# Altium footprint library SBC_PcbLib.PcbLib: 52 footprints (part 4 of 4)
Each footprint in its own frame and in the unit in brackets; x right, y up, seen from the top. Pads: shape width x height; smd on the part's side, far side on the other; paste and mask are expansions set on the pad; w line width, h text height; cw(c..) or ccw(c..) is an arc to the next point about the centre after c.
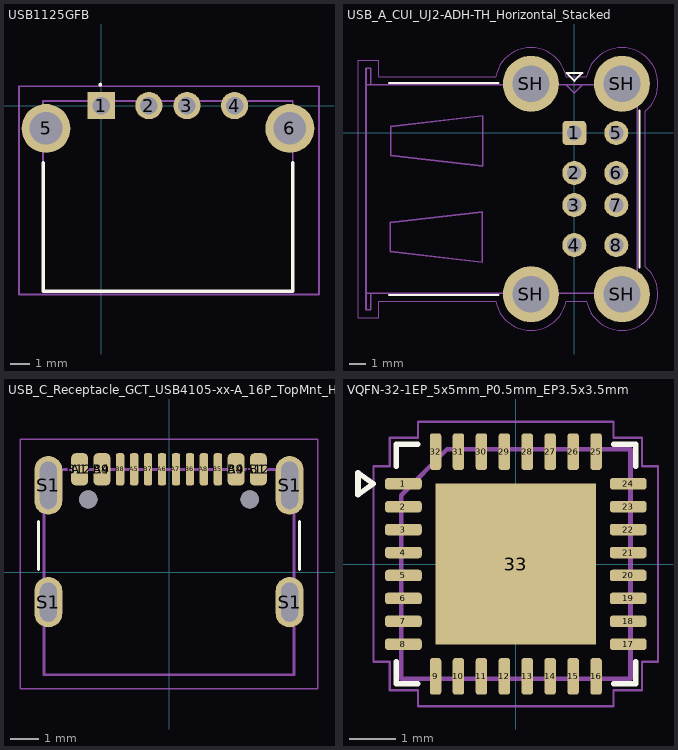
[diagram p3: the footprints below, top view; thin cyan lines are the x and y axes]

## USB1125GFB [mm] "USB1125-GF-B-4"
pads (6):
  rect 1.431x1.431 hole 0.92: 1(0,0)
  round 1.431 hole 0.92: 2(2.5,0) 3(4.5,0) 4(7,0)
  round 2.565 hole 1.71: 5(-2.9,-1.2) 6(9.9,-1.2)
Top Overlay:
  lines w0.1: -0.05,1.05 cw(c-0.05,1.1) -0.05,1.15 cw(c-0.05,1.1) -0.05,1.05
  lines w0.2: -3.05,-3 -3.05,-9.75 10.05,-9.75 10.05,-3
Mechanical 15:
  lines w0.1: -4.318,-9.906 11.43,-9.906 11.43,1.016 -4.318,1.016 -4.318,-9.906
Top Assembly:
  lines w0.1: -3.05,-9.75 10.05,-9.75 10.05,0.25 -3.05,0.25 -3.05,-9.75
  text ".Designator" at -2.144,-5.842 h1.27
3D body "USB1125-GF-B.stp": height 6.49, standoff -2.52, extent -3.121,-9.662 9.979,0.338

## USB_A_CUI_UJ2-ADH-TH_Horizontal_Stacked [mm] "USB-A two stacked horizontal receptacle, through-hole (https://www.cuidevices.com/product/resource/uj2-adh-th.pdf)"
pads (12):
  rrect33% 1.5x1.5 hole 0.92: 1(0,0)
  round 1.5 hole 0.92: 2(0,-2.5) 3(0,-4.5) 4(0,-7) 5(2.62,0) 6(2.62,-2.5) 7(2.62,-4.5) 8(2.62,-7)
  round 3.5 hole 2.3: SH(-2.71,-10.07) SH(-2.71,3.07) SH(2.97,-10.07) SH(2.97,3.07)
Top Overlay:
  lines w0.12: -11.58,-10.13 -4.73,-10.13 ; -11.58,3.13 -4.73,3.13 ; 4.07,-8.4 4.07,1.4 ; -0.5,3.75 0.5,3.75 0,3.25 -0.5,3.75
Mechanical 2:
  text ".Comment" at -4.6,-14.68 h1
Top Courtyard:
  lines w0.05: -13.51,-11.55 -12.21,-11.55 -12.21,-10.5 -4.92,-10.5 ccw(c-2.71,-10.07) -0.5,-10.5 0.76,-10.5 ccw(c2.972,-10.07) 4.44,-8.36 4.44,1.36 ccw(c2.972,3.07) 0.76,3.5 -0.5,3.5 ccw(c-2.71,3.07) -4.92,3.5 -12.21,3.5 -12.21,4.55 -13.51,4.55 -13.51,-11.55
Top Assembly:
  lines w0.1: -0.5,3 0,2.5 0.5,3 ; -13.01,-10 3.94,-10 3.94,3 -13.01,3 ; -13.01,-10 -13.01,-11.05 -12.71,-11.05 -12.71,-10 -13.01,-10 ; -13.01,-10 -13.01,3 ; -13.01,3 -12.71,3 -12.71,4.05 -13.01,4.05 -13.01,3 ; -11.49,-7.405 -5.74,-8.065 -5.74,-4.935 -11.49,-5.595 -11.49,-7.405 ; -11.46,-1.405 -5.71,-2.065 -5.71,1.065 -11.46,0.405 -11.46,-1.405
  text ".Designator" at -5.735,-4 h1
3D body "Same_Sky_UJ2-ADH-3-TH.step": height 16.18, standoff -3.24, extent -13.029,-11.58 4.064,4.468

## USB_C_Receptacle_GCT_USB4105-xx-A_16P_TopMnt_Horizontal [mm] "USB 2.0 Type C Receptacle, GCT, 16P, top mounted, horizontal, 5A: https://gct.co/files/drawings/usb4105.pdf"
pads (22):
  rrect50% 0.6x1.15 smd: A1(-3.2,3.68) A4(-2.4,3.68) A9(2.4,3.68) A12(3.2,3.68) B1(3.2,3.68) B4(2.4,3.68) B9(-2.4,3.68) B12(-3.2,3.68)
  rrect50% 0.3x1.15 smd: A5(-1.25,3.68) A6(-0.25,3.68) A7(0.25,3.68) A8(1.25,3.68) B5(1.75,3.68) B6(0.75,3.68) B7(-0.75,3.68) B8(-1.75,3.68)
  oval 1x1.8 hole 0.6 slot 1.4 at 90 deg: S1(-4.32,-1.075) S1(4.32,-1.075)
  oval 1x2.1 hole 0.6 slot 1.7 at 90 deg: S1(-4.32,3.105) S1(4.32,3.105)
  round 0.65 hole 0.65 unplated: ""(-2.89,2.605) ""(2.89,2.605)
Top Overlay:
  lines w0.12: -4.67,0.1 -4.67,1.8 ; 4.67,0.1 4.67,1.8
Bottom Courtyard:
  text "PCB Edge" at -1.6,-3.35 h0.5
Mechanical 15:
  lines w0.05: -5.32,-4.18 5.32,-4.18 5.32,4.76 -5.32,4.76 -5.32,-4.18
Top Assembly:
  lines w0.1: -4.47,-3.675 -4.47,3.675 4.47,3.675 4.47,-3.675 -4.47,-3.675
  text ".Designator" at -5.08,-0.635 h1
3D body "USB4105-GF-A.STEP": height 3.32, standoff -1.09, extent -4.47,-3.519 4.47,4.191

## VQFN-32-1EP_5x5mm_P0.5mm_EP3.5x3.5mm [mm] "VQFN, 32 Pin (https://www.ftdichip.com/Support/Documents/DataSheets/ICs/DS_FT4222H.pdf#page=40)"
pads (33):
  rrect50% 0.8x0.25 smd: 1(-2.45,1.75) 2(-2.45,1.25) 3(-2.45,0.75) 4(-2.45,0.25) 5(-2.45,-0.25) 6(-2.45,-0.75) 7(-2.45,-1.25) 8(-2.45,-1.75) 17(2.45,-1.75) 18(2.45,-1.25) 19(2.45,-0.75) 20(2.45,-0.25) 21(2.45,0.25) 22(2.45,0.75) 23(2.45,1.25) 24(2.45,1.75)
  rrect50% 0.25x0.8 smd: 9(-1.75,-2.45) 10(-1.25,-2.45) 11(-0.75,-2.45) 12(-0.25,-2.45) 13(0.25,-2.45) 14(0.75,-2.45) 15(1.25,-2.45) 16(1.75,-2.45) 25(1.75,2.45) 26(1.25,2.45) 27(0.75,2.45) 28(0.25,2.45) 29(-0.25,2.45) 30(-0.75,2.45) 31(-1.25,2.45) 32(-1.75,2.45)
  rect 3.5x3.5 smd paste-1.75: 33(0,0)
Top Overlay:
  lines w0.12: -2.61,-2.135 -2.61,-2.61 -2.135,-2.61 ; -2.61,2.135 -2.61,2.61 -2.135,2.61 ; 2.135,-2.61 2.61,-2.61 2.61,-2.135 ; 2.135,2.61 2.61,2.61 2.61,2.135 ; -3.44,1.51 -3.44,1.99 -3.11,1.75 -3.44,1.51
Top Paste:
  rectangle: 0.17,-1.58 1.58,-0.17
  rectangle: 0.17,0.17 1.58,1.58
  rectangle: -1.58,-1.58 -0.17,-0.17
  rectangle: -1.58,0.17 -0.17,1.58
Top Courtyard:
  lines w0.05: -3.1,-2.13 -2.75,-2.13 -2.75,-2.75 -2.13,-2.75 -2.13,-3.1 2.13,-3.1 2.13,-2.75 2.75,-2.75 2.75,-2.13 3.1,-2.13 3.1,2.13 2.75,2.13 2.75,2.75 2.13,2.75 2.13,3.1 -2.13,3.1 -2.13,2.75 -2.75,2.75 -2.75,2.13 -3.1,2.13 -3.1,-2.13
Top Assembly:
  lines w0.1: -2.5,-2.5 2.5,-2.5 2.5,2.5 -1.5,2.5 -2.5,1.5 -2.5,-2.5
  text ".Designator" at -3.937,-4.064 h1
3D body "NAU88C22YG.step": height 0.8, standoff 0, extent -2.5,-2.5 2.5,2.5